# EAGLE library part 6213XX21821_62132421821 (library WR-PHD)
WR-PHD 2.00 mm Dual SMT Socket Header Low Profile Bottom Entry Article Properties Pins 4 unitless; 6 unitless; 8 unitless; 10 unitless; 14 unitless; 16 unitless; 20 unitless; 24 unitless General Information Operating Temperature -40 °C up to +105 °C Compliance Lead free / RoHS Pitch 2 mm Durability 50 Cycles Rows Dual Gender Socket Header Type Straight Material Properties Insulator Material PA9T Insulator Flammability Rating UL94 V-0 Contact Material Copper Alloy Contact Plating Gold Contact Type Stamped Certification UL Approval E323964 Packaging Properties Packaging Tape and Reel with Cap; Tube Electrical Properties IR 2 A Withstanding Voltage 500 V (AC) Contact Resistance 20 mΩ RISO 1000 MΩ <https://www.we-online.com/components/media/o33222v209%20Family_WR-PHD_621xxx21821.jpg> Details see: www.we-online.com/en/components/products/PHD_2_0_SMT_DUAL_SOCKET_HEADER_LOW_PROFILE_6210XX21821 <www.we-online.com/catalog/PHD_2_0_SMT_DUAL_SOCKET_HEADER_LOW_PROFILE_6210XX21821/?utm_source=eagle_model&utm_medium=description_link&utm_campaign=eisos_eagle> Updated by Ella 2024-01-31 2024 (C) Würth Elektronik
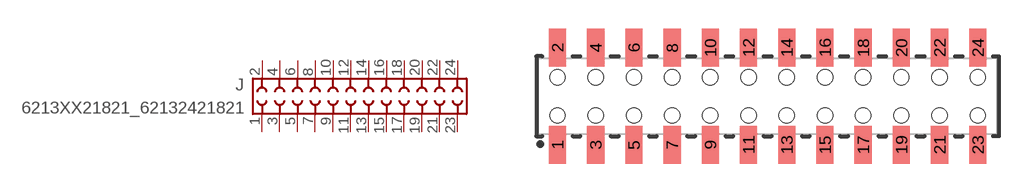
[diagram p398: symbol with the pads of 62132421821; footprint 62132421821]

Designator prefix J

## 6213XX21821_62132421821 (DATASHEET-URL: https://www.we-online.com/redexpert/spec/62132421821?ae; GENDER: Socket Header; IR: 2A; MOUNT: SMT; PACKAGING: Tape and Reel with Cap; PART-NUMBER: 62132421821; PINS: 24; PITCH: 2.00 mm; ROWS: Dual; TYPE: Straight; VALUE: 62132421821)  [62132421821]
1  1  pas
2  2  pas
3  3  pas
4  4  pas
5  5  pas
6  6  pas
7  7  pas
8  8  pas
9  9  pas
10  10  pas
11  11  pas
12  12  pas
13  13  pas
14  14  pas
15  15  pas
16  16  pas
17  17  pas
18  18  pas
19  19  pas
20  20  pas
21  21  pas
22  22  pas
23  23  pas
24  24  pas

## Footprint 62132421821 (pad centres in mm)
WR-PHD 2.00 mm Dual SMT Socket Header Low Profile (Reel),24 Pins
smd 0.9 x 2: 1 -11,-2.55; 2 -11,2.55; 3 -9,-2.55; 4 -9,2.55; 5 -7,-2.55; 6 -7,2.55; 7 -5,-2.55; 8 -5,2.55; 9 -3,-2.55; 10 -3,2.55; 11 -1,-2.55; 12 -1,2.55; 13 1,-2.55; 14 1,2.55; 15 3,-2.55; 16 3,2.55; 17 5,-2.55; 18 5,2.55; 19 7,-2.55; 20 7,2.55; 21 9,-2.55; 22 9,2.55; 23 11,-2.55; 24 11,2.55
hole 0.8 at -11,1
hole 0.8 at -11,-1
hole 0.8 at -9,1
hole 0.8 at -9,-1
hole 0.8 at -7,-1
hole 0.8 at -7,1
hole 0.8 at -5,1
hole 0.8 at -5,-1
hole 0.8 at -3,1
hole 0.8 at -3,-1
hole 0.8 at -1,1
hole 0.8 at 1,1
hole 0.8 at 1,-1
hole 0.8 at -1,-1
hole 0.8 at 3,1
hole 0.8 at 3,-1
hole 0.8 at 5,1
hole 0.8 at 7,1
hole 0.8 at 7,-1
hole 0.8 at 5,-1
hole 0.8 at 9,-1
hole 0.8 at 11,-1
hole 0.8 at 11,1
hole 0.8 at 9,1